# Altium schematic symbol library DC550200-1095-2H.SCHLIB: 1 symbol
Pins are listed as number, name and electrical type; pins without a type are passive.

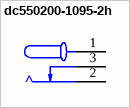
[diagram p0: symbol dc550200-1095-2h]

## dc550200-1095-2h
designator DC??  (value not drawn)
连接器类型:DC电源插座;安装方式:弯插;触点外径:6.4mm;额定电流:5A;额定电压:60V;; Manufacturer: HDGC(华德共创); AddInBom: yes; ModelId: 56d1b1affb614907a521073155fd6544; ModelName: DC-IN-TH_DC550200-1095-2H; ModelTransform: 417.322,559.054,0,0,0,0,-84.643,-145.667,-118.11; Connector Type: DC电源插座; Outside Contact Diameter: 6.4mm; Current Rating: 5A; Voltage Rating (Max): 60V; Body Height: 11.5mm; Symbol: DC550200-1095-2H; LCSC Part Name: DC电源插座 外径:6.4mm; SupplierPart: C7587689; ManufacturerPart: DC550200-1095-2H; Supplier Footprint: 插件; JLCPCB Part Class: Extended Part; Datasheet: https://item.szlcsc.com/datasheet/DC550200-1095-2H/8703781.html; Supplier: LCSC; ConvertToPcb: yes; FootprintName: DC-IN-TH_DC550200-1095-2H; Mounting Type: 弯插; Length: 14.2mm; Width: 10.6mm
footprint DC-IN-TH_DC550200-1095-2H
pins: 1 +, 2 -, 3